# EAGLE library part HEADER-8 (library madhu)
8 pin header
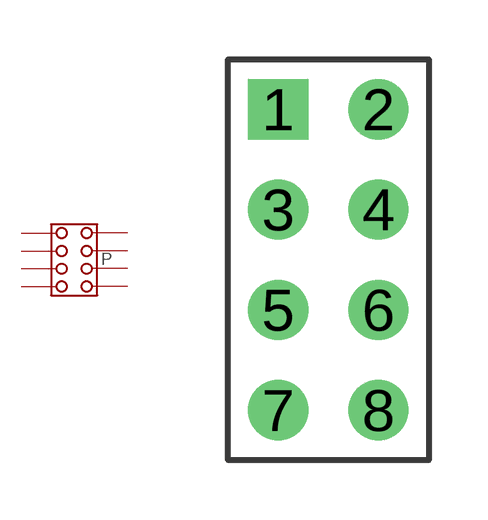
[diagram p9: symbol with the pads of HEADER-8; footprint HEADER-8]

Designator prefix P

## HEADER-80.1  [HEADER-8]
1  1
2  2
3  3
4  4
5  5
6  6
7  7
8  8

## Footprint HEADER-8 (pad centres in mm)
8 pin header grid 2.5 mm, outline 2.4 x 4.4 mm
drill 1.016 square: 1 -1.27,2.54
drill 1.016: 2 1.27,2.54; 3 -1.27,0; 4 1.27,0; 5 -1.27,-2.54; 6 1.27,-2.54; 7 -1.27,-5.08; 8 1.27,-5.08